# Altium footprint library FootPrintLib_11.PcbLib: 376 footprints (part 10 of 24)
Each footprint in its own frame and in the unit in brackets; x right, y up, seen from the top. Pads: shape width x height; smd on the part's side, far side on the other; paste and mask are expansions set on the pad; w line width, h text height; cw(c..) or ccw(c..) is an arc to the next point about the centre after c.
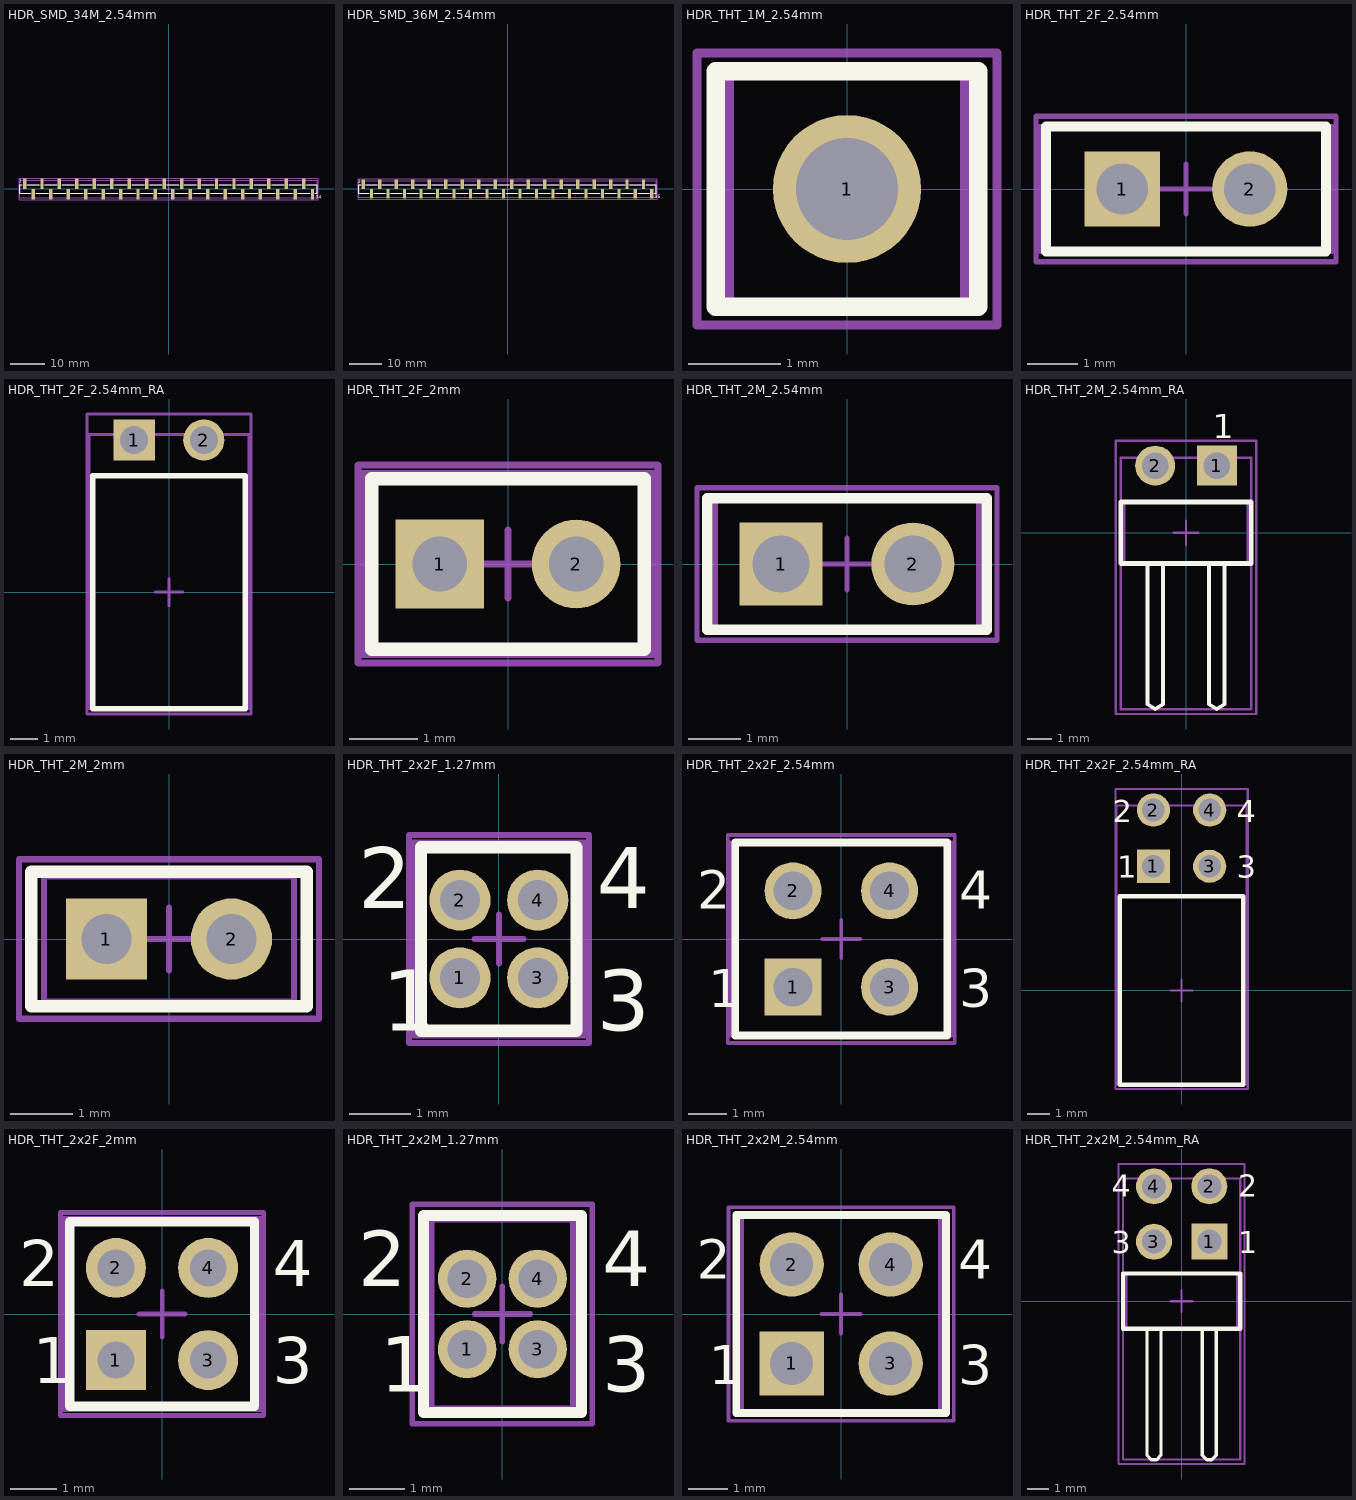
[diagram p9: the footprints below, top view; thin cyan lines are the x and y axes]

## HDR_SMD_34M_2.54mm [mm] "Pin Header, pitch 2.54 mm, SMD, Vertical, single row, 34p"
height 9.3
pads (34):
  rect 1x3 smd: 1(-41.91,1.5) 2(-39.37,-1.5) 3(-36.83,1.5) 4(-34.29,-1.5) 5(-31.75,1.5) 6(-29.21,-1.5) 7(-26.67,1.5) 8(-24.13,-1.5) 9(-21.59,1.5) 10(-19.05,-1.5) 11(-16.51,1.5) 12(-13.97,-1.5) 13(-11.43,1.5) 14(-8.89,-1.5) 15(-6.35,1.5) 16(-3.81,-1.5) 17(-1.27,1.5) 18(1.27,-1.5) 19(3.81,1.5) 20(6.35,-1.5) 21(8.89,1.5) 22(11.43,-1.5) 23(13.97,1.5) 24(16.51,-1.5) 25(19.05,1.5) 26(21.59,-1.5) 27(24.13,1.5) 28(26.67,-1.5) 29(29.21,1.5) 30(31.75,-1.5) 31(34.29,1.5) 32(36.83,-1.5) 33(39.37,1.5) 34(41.91,-1.5)
Top Overlay:
  lines w0.2: -42.7,1.27 -43.33,1.27 -43.33,-1.27 -40.15,-1.27 ; -41.1,1.27 -37.6,1.27 ; -38.56,-1.27 -35.06,-1.27 ; -36.02,1.27 -32.52,1.27 ; -33.48,-1.27 -29.98,-1.27 ; -30.94,1.27 -27.44,1.27 ; -28.4,-1.27 -24.9,-1.27 ; -25.86,1.27 -22.36,1.27 ; -23.32,-1.27 -19.82,-1.27 ; -20.78,1.27 -17.28,1.27 ; -18.24,-1.27 -14.74,-1.27 ; -15.7,1.27 -12.2,1.27 ; -13.16,-1.27 -9.66,-1.27 ; -10.62,1.27 -7.12,1.27 ; -8.08,-1.27 -4.58,-1.27 ; -5.54,1.27 -2.04,1.27 ; -3,-1.27 0.5,-1.27 ; -0.46,1.27 3.04,1.27 ; 2.08,-1.27 5.58,-1.27 ; 4.62,1.27 8.12,1.27 ; 7.16,-1.27 10.66,-1.27 ; 9.7,1.27 13.2,1.27 ; 12.24,-1.27 15.74,-1.27 ; 14.78,1.27 18.28,1.27 ; 17.32,-1.27 20.82,-1.27 ; 19.86,1.27 23.36,1.27 ; 22.4,-1.27 25.9,-1.27 ; 24.94,1.27 28.44,1.27 ; 27.48,-1.27 30.98,-1.27 ; 30.02,1.27 33.52,1.27 ; 32.56,-1.27 36.06,-1.27 ; 35.1,1.27 38.6,1.27 ; 37.64,-1.27 41.14,-1.27 ; 40.2,1.27 43.33,1.27 43.33,-1.27 42.7,-1.27
  text "34" at 42.8,-2.8 h1
  text "1" at -43.4,1.8 h1
Mechanical 11:
  lines w0.1: -43.18,-1.27 43.18,-1.27 43.18,1.27 -43.18,1.27 -43.18,-1.27
Mechanical 13:
  lines w0.1: -43.33,-2.5 -43.33,2.5 43.33,2.5 43.33,-2.5 -43.33,-2.5
Mechanical 15:
  lines w0.1: -0.5,0 0.5,0 ; 0,-0.5 0,0.5 ; -43.53,-3.2 -43.53,3.2 43.53,3.2 43.53,-3.2 -43.53,-3.2
3D body "61003418321.stp": height 9.37, standoff 0.04, extent -43.18,-2.5 43.18,2.5

## HDR_SMD_36M_2.54mm [mm] "Pin Header, pitch 2.54 mm, SMD, Vertical, single row, 36p"
height 9.3
pads (36):
  rect 1x3 smd: 1(-44.45,1.5) 2(-41.91,-1.5) 3(-39.37,1.5) 4(-36.83,-1.5) 5(-34.29,1.5) 6(-31.75,-1.5) 7(-29.21,1.5) 8(-26.67,-1.5) 9(-24.13,1.5) 10(-21.59,-1.5) 11(-19.05,1.5) 12(-16.51,-1.5) 13(-13.97,1.5) 14(-11.43,-1.5) 15(-8.89,1.5) 16(-6.35,-1.5) 17(-3.81,1.5) 18(-1.27,-1.5) 19(1.27,1.5) 20(3.81,-1.5) 21(6.35,1.5) 22(8.89,-1.5) 23(11.43,1.5) 24(13.97,-1.5) 25(16.51,1.5) 26(19.05,-1.5) 27(21.59,1.5) 28(24.13,-1.5) 29(26.67,1.5) 30(29.21,-1.5) 31(31.75,1.5) 32(34.29,-1.5) 33(36.83,1.5) 34(39.37,-1.5) 35(41.91,1.5) 36(44.45,-1.5)
Top Overlay:
  lines w0.2: -45.24,1.27 -45.87,1.27 -45.87,-1.27 -42.69,-1.27 ; -43.64,1.27 -40.14,1.27 ; -41.1,-1.27 -37.6,-1.27 ; -38.56,1.27 -35.06,1.27 ; -36.02,-1.27 -32.52,-1.27 ; -33.48,1.27 -29.98,1.27 ; -30.94,-1.27 -27.44,-1.27 ; -28.4,1.27 -24.9,1.27 ; -25.86,-1.27 -22.36,-1.27 ; -23.32,1.27 -19.82,1.27 ; -20.78,-1.27 -17.28,-1.27 ; -18.24,1.27 -14.74,1.27 ; -15.7,-1.27 -12.2,-1.27 ; -13.16,1.27 -9.66,1.27 ; -10.62,-1.27 -7.12,-1.27 ; -8.08,1.27 -4.58,1.27 ; -5.54,-1.27 -2.04,-1.27 ; -3,1.27 0.5,1.27 ; -0.46,-1.27 3.04,-1.27 ; 2.08,1.27 5.58,1.27 ; 4.62,-1.27 8.12,-1.27 ; 7.16,1.27 10.66,1.27 ; 9.7,-1.27 13.2,-1.27 ; 12.24,1.27 15.74,1.27 ; 14.78,-1.27 18.28,-1.27 ; 17.32,1.27 20.82,1.27 ; 19.86,-1.27 23.36,-1.27 ; 22.4,1.27 25.9,1.27 ; 24.94,-1.27 28.44,-1.27 ; 27.48,1.27 30.98,1.27 ; 30.02,-1.27 33.52,-1.27 ; 32.56,1.27 36.06,1.27 ; 35.1,-1.27 38.6,-1.27 ; 37.64,1.27 41.14,1.27 ; 40.18,-1.27 43.68,-1.27 ; 42.74,1.27 45.87,1.27 45.87,-1.27 45.24,-1.27
  text "36" at 45.34,-2.8 h1
  text "1" at -45.94,1.8 h1
Mechanical 11:
  lines w0.1: -45.72,-1.27 -45.72,1.27 45.72,1.27 45.72,-1.27 -45.72,-1.27
Mechanical 13:
  lines w0.1: -45.87,-2.5 45.87,-2.5 45.87,2.5 -45.87,2.5 -45.87,-2.5
Mechanical 15:
  lines w0.1: -0.5,0 0.5,0 ; 0,-0.5 0,0.5 ; -46.07,-3.2 46.07,-3.2 46.07,3.2 -46.07,3.2 -46.07,-3.2
3D body "61003618321.stp": height 9.37, standoff 0.04, extent -45.72,-2.5 45.72,2.5

## HDR_THT_1M_2.54mm [mm] "Pin Header, pitch 2.54 mm, THT, Vertical, single row, 1p"
height 8.54
pads (1):
  round 1.6 hole 1.1: 1(0,0)
Top Overlay:
  lines w0.2: -1.42,-1.27 -1.42,1.27 1.42,1.27 1.42,-1.27 -1.42,-1.27
Mechanical 11:
  lines w0.1: -1.27,-1.27 -1.27,1.27 1.27,1.27 1.27,-1.27 -1.27,-1.27
Mechanical 13:
  lines w0.1: -1.42,-1.27 -1.42,1.27 1.42,1.27 1.42,-1.27 -1.42,-1.27
Mechanical 15:
  lines w0.1: -0.5,0 0.5,0 ; 0,-0.5 0,0.5 ; -1.62,-1.47 -1.62,1.47 1.62,1.47 1.62,-1.47 -1.62,-1.47
3D body "61300111121.stp": height 8.57, standoff -2.97, extent -1.27,-1.27 1.27,1.27

## HDR_THT_2F_2.54mm [mm] "Socket Header, Pitch 2.54 mm, THT, Vertical, single row, 2p"
height 8.5
pads (2):
  rect 1.5x1.5 hole 1.02: 1(-1.27,0)
  round 1.5 hole 1.02: 2(1.27,0)
Top Overlay:
  lines w0.2: -2.79,-1.25 2.79,-1.25 2.79,1.25 -2.79,1.25 -2.79,-1.25
Mechanical 11:
  lines w0.1: -2.79,-1.25 2.79,-1.25 2.79,1.25 -2.79,1.25 -2.79,-1.25
Mechanical 13:
  lines w0.1: -2.915,-1.25 -2.915,1.25 2.915,1.25 2.915,-1.25 -2.915,-1.25
Mechanical 15:
  lines w0.1: -0.5,0 0.5,0 ; 0,-0.5 0,0.5 ; -2.99,-1.45 -2.99,1.45 2.99,1.45 2.99,-1.45 -2.99,-1.45
3D body "61300211821.stp": height 8.55, standoff -3.06, extent -2.79,-1.25 2.79,1.25

## HDR_THT_2F_2.54mm_RA [mm] "Socket Header, Pitch 2.54 mm, THT, Angled, single row, 2p"
height 2.5
pads (2):
  rect 1.5x1.5 hole 1.02: 1(-1.27,5.55)
  round 1.5 hole 1.02: 2(1.27,5.55)
Top Overlay:
  lines w0.2: -2.79,-4.25 -2.79,4.25 2.79,4.25 2.79,-4.25 -2.79,-4.25
Mechanical 11:
  lines w0.1: -2.79,-4.25 2.79,-4.25 2.79,4.25 -2.79,4.25 -2.79,-4.25
Mechanical 13:
  lines w0.1: -2.915,-4.25 -2.915,5.75 2.915,5.75 2.915,-4.25 -2.915,-4.25
Mechanical 15:
  lines w0.1: -0.5,0 0.5,0 ; 0,-0.5 0,0.5 ; -2.99,-4.45 -2.99,6.5 2.99,6.5 2.99,-4.45 -2.99,-4.45
3D body "613002143121.stp": height 2.55, standoff -3.04, extent -2.79,-4.25 2.79,5.75

## HDR_THT_2F_2mm [mm] "Socket Header, Pitch 2.00 mm, THT, Vertical, single row, 2p"
height 4.45
pads (2):
  rect 1.3x1.3 hole 0.8: 1(-1,0)
  round 1.3 hole 0.8: 2(1,0)
Top Overlay:
  lines w0.2: -2,-1.25 2,-1.25 2,1.25 -2,1.25 -2,-1.25
Mechanical 11:
  lines w0.1: -2,-1.25 2,-1.25 2,1.25 -2,1.25 -2,-1.25
Mechanical 13:
  lines w0.1: -2.15,-1.325 2.15,-1.325 2.15,1.325 -2.15,1.325 -2.15,-1.325
Mechanical 15:
  lines w0.1: -0.5,0 0.5,0 ; 0,-0.5 0,0.5 ; -2.2,-1.45 2.2,-1.45 2.2,1.45 -2.2,1.45 -2.2,-1.45
3D body "62000211821.stp": height 4.35, standoff -2.65, extent -2.25,-1.25 2.25,1.25

## HDR_THT_2M_2.54mm [mm] "Pin Header, pitch 2.54 mm, THT, Vertical, single row, 2p"
height 8.54
pads (2):
  rect 1.6x1.6 hole 1.1: 1(-1.27,0)
  round 1.6 hole 1.1: 2(1.27,0)
Top Overlay:
  lines w0.2: -2.69,-1.27 2.69,-1.27 2.69,1.27 -2.69,1.27 -2.69,-1.27
Mechanical 11:
  lines w0.1: -2.54,-1.27 2.54,-1.27 2.54,1.27 -2.54,1.27 -2.54,-1.27
Mechanical 13:
  lines w0.1: -2.69,-1.27 2.69,-1.27 2.69,1.27 -2.69,1.27 -2.69,-1.27
Mechanical 15:
  lines w0.1: -0.5,0 0.5,0 ; 0,-0.5 0,0.5 ; -2.89,-1.47 2.89,-1.47 2.89,1.47 -2.89,1.47 -2.89,-1.47
3D body "61300211121.stp": height 8.57, standoff -2.97, extent -2.54,-1.27 2.54,1.27

## HDR_THT_2M_2.54mm_RA [mm] "Pin Header, pitch 2.54 mm, THT, Angled, single row, 2p"
height 2.54
pads (2):
  rect 1.65x1.65 hole 1.1: 1(1.27,2.77)
  round 1.65 hole 1.1: 2(-1.27,2.77)
Top Overlay:
  lines w0.15: -1.59,-1.27 -1.59,-7.07 -1.27,-7.27 -0.95,-7.07 -0.95,-1.27 ; 0.95,-1.27 0.95,-7.07 1.27,-7.27 1.59,-7.07 1.59,-1.27
  lines w0.2: -2.69,-1.27 2.69,-1.27 2.69,1.27 -2.69,1.27 -2.69,-1.27
  text "1" at 1.1,3.9 h1
Mechanical 11:
  lines w0.1: -2.54,-1.27 2.54,-1.27 2.54,1.27 -2.54,1.27 -2.54,-1.27
Mechanical 13:
  lines w0.1: -2.69,-7.27 -2.69,3.09 2.69,3.09 2.69,-7.27 -2.69,-7.27
Mechanical 15:
  lines w0.1: -0.5,0 0.5,0 ; 0,-0.5 0,0.5 ; -2.89,-7.47 -2.89,3.795 2.89,3.795 2.89,-7.47 -2.89,-7.47
3D body "61300211021.stp": height 2.62, standoff -2.92, extent -2.54,-7.27 2.54,3.09

## HDR_THT_2M_2mm [mm] "Pin Header, pitch 2.00 mm, THT, Vertical, single row, 2p"
height 6.35
pads (2):
  rect 1.3x1.3 hole 0.8: 1(-1,0)
  round 1.3 hole 0.8: 2(1,0)
Top Overlay:
  lines w0.2: -2.2,-1.075 -2.2,1.075 2.2,1.075 2.2,-1.075 -2.2,-1.075
Mechanical 11:
  lines w0.1: -2,-1 -2,1 2,1 2,-1 -2,-1
Mechanical 13:
  lines w0.1: -2.2,-1.075 -2.2,1.075 2.2,1.075 2.2,-1.075 -2.2,-1.075
Mechanical 15:
  lines w0.1: -0.5,0 0.5,0 ; 0,-0.5 0,0.5 ; -2.4,-1.275 -2.4,1.275 2.4,1.275 2.4,-1.275 -2.4,-1.275
3D body "62000211121.stp": height 6.05, standoff -2.65, extent -2,-1 2,1

## HDR_THT_2x2F_1.27mm [mm] "Socket Header, Pitch 1.27 mm, THT, Vertical, dual row, 4p"
height 4.65
pads (4):
  round 1 hole 0.65: 1(-0.635,-0.635) 2(-0.635,0.635) 3(0.635,-0.635) 4(0.635,0.635)
Top Overlay:
  lines w0.2: -1.27,-1.5 1.27,-1.5 1.27,1.5 -1.27,1.5 -1.27,-1.5
  text "4" at 1.6,0.5 h1
  text "2" at -2.3,0.5 h1
  text "3" at 1.6,-1.5 h1
  text "1" at -1.9,-1.5 h1
Mechanical 11:
  lines w0.1: -1.27,-1.5 1.27,-1.5 1.27,1.5 -1.27,1.5 -1.27,-1.5
Mechanical 13:
  lines w0.1: -1.395,-1.575 -1.395,1.575 1.395,1.575 1.395,-1.575 -1.395,-1.575
Mechanical 15:
  lines w0.1: -0.4,0 0.4,0 ; 0,-0.4 0,0.4 ; -1.47,-1.7 1.47,-1.7 1.47,1.7 -1.47,1.7 -1.47,-1.7
3D body "62200421821.stp": height 4.55, standoff -2.15, extent -1.47,-1.5 1.47,1.5

## HDR_THT_2x2F_2.54mm [mm] "Socket Header, Pitch 2.54 mm, THT, Vertical, dual row, 4p"
height 8.4
pads (4):
  rect 1.5x1.5 hole 1.02: 1(-1.27,-1.27)
  round 1.5 hole 1.02: 2(-1.27,1.27) 3(1.27,-1.27) 4(1.27,1.27)
Top Overlay:
  lines w0.2: -2.79,-2.54 2.79,-2.54 2.79,2.54 -2.79,2.54 -2.79,-2.54
  text "1" at -3.5,-1.8 h1
  text "3" at 3.1,-1.8 h1
  text "2" at -3.8,0.8 h1
  text "4" at 3.1,0.8 h1
Mechanical 11:
  lines w0.1: -2.79,-2.54 -2.79,2.54 2.79,2.54 2.79,-2.54 -2.79,-2.54
Mechanical 13:
  lines w0.1: -2.915,-2.54 2.915,-2.54 2.915,2.54 -2.915,2.54 -2.915,-2.54
Mechanical 15:
  lines w0.1: -0.5,0 0.5,0 ; 0,-0.5 0,0.5 ; -2.99,-2.74 2.99,-2.74 2.99,2.74 -2.99,2.74 -2.99,-2.74
3D body "61300421821.stp": height 8.45, standoff -3.05, extent -2.79,-2.54 2.79,2.54

## HDR_THT_2x2F_2.54mm_RA [mm] "Socket Header, Pitch 2.54 mm, THT, Angled, dual row, 4p"
height 5.08
pads (4):
  rect 1.5x1.5 hole 1.02: 1(-1.27,5.61)
  round 1.5 hole 1.02: 2(-1.27,8.15) 3(1.27,5.61) 4(1.27,8.15)
Top Overlay:
  lines w0.2: -2.79,-4.25 2.79,-4.25 2.79,4.25 -2.79,4.25 -2.79,-4.25
  text "1" at -2.9,5.1 h1
  text "2" at -3.1,7.6 h1
  text "3" at 2.5,5.1 h1
  text "4" at 2.5,7.6 h1
Mechanical 11:
  lines w0.1: -2.79,-4.25 -2.79,4.25 2.79,4.25 2.79,-4.25 -2.79,-4.25
Mechanical 13:
  lines w0.1: -2.94,-4.25 -2.94,8.35 2.94,8.35 2.94,-4.25 -2.94,-4.25
Mechanical 15:
  lines w0.1: -0.5,0 0.5,0 ; 0,-0.5 0,0.5 ; -2.99,-4.45 -2.99,9.1 2.99,9.1 2.99,-4.45 -2.99,-4.45
3D body "613004243121.stp": height 5.05, standoff -3.25, extent -2.79,-4.25 2.79,8.35

## HDR_THT_2x2F_2mm [mm] "Socket Header, Pitch 2.00 mm, THT, Vertical, dual row, 4p"
height 4.45
pads (4):
  rect 1.3x1.3 hole 0.8: 1(-1,-1)
  round 1.3 hole 0.8: 2(-1,1) 3(1,-1) 4(1,1)
Top Overlay:
  lines w0.2: -2,-2 -2,2 2,2 2,-2 -2,-2
  text "1" at -2.8,-1.5 h1
  text "3" at 2.4,-1.5 h1
  text "2" at -3.1,0.6 h1
  text "4" at 2.4,0.6 h1
Mechanical 11:
  lines w0.1: -2,-2 -2,2 2,2 2,-2 -2,-2
Mechanical 13:
  lines w0.1: -2.15,-2.075 -2.15,2.075 2.15,2.075 2.15,-2.075 -2.15,-2.075
Mechanical 15:
  lines w0.1: -0.5,0 0.5,0 ; 0,-0.5 0,0.5 ; -2.2,-2.2 -2.2,2.2 2.2,2.2 2.2,-2.2 -2.2,-2.2
3D body "62000421821.stp": height 4.35, standoff -2.35, extent -2.25,-2 2.25,2

## HDR_THT_2x2M_1.27mm [mm] "Pin Header, pitch 1.27 mm, THT, Vertical, dual row, 4p"
height 5.65
pads (4):
  round 1.05 hole 0.7: 1(-0.635,-0.635) 2(-0.635,0.635) 3(0.635,-0.635) 4(0.635,0.635)
Top Overlay:
  lines w0.2: -1.42,-1.775 1.42,-1.775 1.42,1.775 -1.42,1.775 -1.42,-1.775
  text "3" at 1.8,-1.4 h1
  text "4" at 1.8,0.5 h1
  text "2" at -2.6,0.5 h1
  text "1" at -2.2,-1.4 h1
Mechanical 11:
  lines w0.1: -1.27,-1.7 1.27,-1.7 1.27,1.7 -1.27,1.7 -1.27,-1.7
Mechanical 13:
  lines w0.1: -1.42,-1.775 1.42,-1.775 1.42,1.775 -1.42,1.775 -1.42,-1.775
Mechanical 15:
  lines w0.1: -0.5,0 0.5,0 ; 0,-0.5 0,0.5 ; -1.62,-1.975 1.62,-1.975 1.62,1.975 -1.62,1.975 -1.62,-1.975
3D body "62200421121.stp": height 5.33, standoff -2.27, extent -1.27,-1.7 1.27,1.7

## HDR_THT_2x2M_2.54mm [mm] "Pin Header, pitch 2.54 mm, THT, Vertical, dual row, 4p"
height 8.54
pads (4):
  rect 1.65x1.65 hole 1.1: 1(-1.27,-1.27)
  round 1.65 hole 1.1: 2(-1.27,1.27) 3(1.27,-1.27) 4(1.27,1.27)
Top Overlay:
  lines w0.2: -2.69,-2.54 2.69,-2.54 2.69,2.54 -2.69,2.54 -2.69,-2.54
  text "1" at -3.4,-1.8 h1
  text "2" at -3.7,0.9 h1
  text "3" at 3,-1.8 h1
  text "4" at 3,0.9 h1
Mechanical 11:
  lines w0.1: -2.54,-2.54 2.54,-2.54 2.54,2.54 -2.54,2.54 -2.54,-2.54
Mechanical 13:
  lines w0.1: -2.69,-2.54 2.69,-2.54 2.69,2.54 -2.69,2.54 -2.69,-2.54
Mechanical 15:
  lines w0.1: -0.5,0 0.5,0 ; 0,-0.5 0,0.5 ; -2.89,-2.74 2.89,-2.74 2.89,2.74 -2.89,2.74 -2.89,-2.74
3D body "61300421121.stp": height 8.59, standoff -2.95, extent -2.54,-2.54 2.54,2.54

## HDR_THT_2x2M_2.54mm_RA [mm] "Pin Header, pitch 2.54 mm, THT, Angled, dual row, 4p"
height 5.08
pads (4):
  rect 1.65x1.65 hole 1.1: 1(1.27,2.73)
  round 1.65 hole 1.1: 2(1.27,5.27) 3(-1.27,2.73) 4(-1.27,5.27)
Top Overlay:
  lines w0.15: -1.59,-1.335 -1.59,-7.07 -1.39,-7.27 -1.15,-7.27 -0.95,-7.07 -0.95,-1.31 ; 0.95,-1.335 0.95,-7.07 1.15,-7.27 1.39,-7.27 1.59,-7.07 1.59,-1.31
  lines w0.2: -2.69,-1.27 2.69,-1.27 2.69,1.27 -2.69,1.27 -2.69,-1.27
  text "3" at -3.2,2.2 h1
  text "4" at -3.2,4.8 h1
  text "2" at 2.6,4.8 h1
  text "1" at 2.6,2.2 h1
Mechanical 11:
  lines w0.1: -2.54,-1.27 2.54,-1.27 2.54,1.27 -2.54,1.27 -2.54,-1.27
Mechanical 13:
  lines w0.1: -2.69,-7.27 -2.69,5.63 2.69,5.63 2.69,-7.27 -2.69,-7.27
Mechanical 15:
  lines w0.1: -0.5,0 0.5,0 ; 0,-0.5 0,0.5 ; -2.89,-7.47 -2.89,6.295 2.89,6.295 2.89,-7.47 -2.89,-7.47
3D body "61300421021.stp": height 5.14, standoff -2.94, extent -2.54,-7.27 2.54,5.63